# Altium schematic symbol library TS-107-G-AA.SchLib: 1 symbol
Pins are listed as number, name and electrical type; pins without a type are passive.

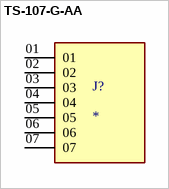
[diagram p0: symbol TS-107-G-AA]

## TS-107-G-AA
designator J?
Conn Unshrouded Header HDR 7 POS 2.54mm Solder ST Top Entry Thru-Hole Tube; MP: TS-107-G-AA; MF: Samtec Inc.; Value: *; Package: None; Check_prices: https://www.snapeda.com/parts/TS-107-G-AA/Samtec/view-part/4675875/?ref=eda; Purchase-URL: https://pricing.snapeda.com/search/part/TS-107-G-AA/?ref=eda; Price: None; SnapEDA_Link: https://www.snapeda.com/parts/TS-107-G-AA/Samtec/view-part/4675875/?ref=snap; Availability: In Stock
footprint SAMTEC_TS-107-G-AA
pins: 01, 02, 03, 04, 05, 06, 07